# Altium footprint library YD-ESP32-S3.PcbLib: 1 footprints
Each footprint in its own frame and in the unit in brackets; x right, y up, seen from the top. Pads: shape width x height; smd on the part's side, far side on the other; paste and mask are expansions set on the pad; w line width, h text height; cw(c..) or ccw(c..) is an arc to the next point about the centre after c.
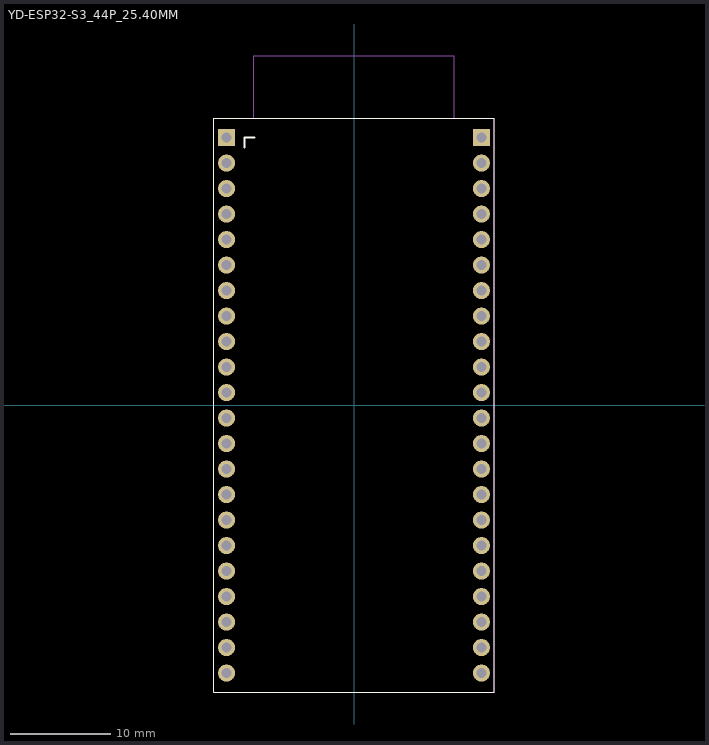
[diagram p0: the footprint, top view; thin cyan lines are the x and y axes]

## YD-ESP32-S3_44P_25.40MM [mm] "YD-ESP32-S3 dual USB-C, 2x22, 2.54 pitch, 25.40 row spacing. VCC-GND-derived land pattern with DevKitC J1/J3 pad designators."
pads (44):
  rect 1.7x1.7 hole 1: J1_1(-12.7,26.67) J3_1(12.7,26.67)
  round 1.7 hole 1: J1_2(-12.7,24.13) J1_3(-12.7,21.59) J1_4(-12.7,19.05) J1_5(-12.7,16.51) J1_6(-12.7,13.97) J1_7(-12.7,11.43) J1_8(-12.7,8.89) J1_9(-12.7,6.35) J1_10(-12.7,3.81) J1_11(-12.7,1.27) J1_12(-12.7,-1.27) J1_13(-12.7,-3.81) J1_14(-12.7,-6.35) J1_15(-12.7,-8.89) J1_16(-12.7,-11.43) J1_17(-12.7,-13.97) J1_18(-12.7,-16.51) J1_19(-12.7,-19.05) J1_20(-12.7,-21.59) J1_21(-12.7,-24.13) J1_22(-12.7,-26.67) J3_2(12.7,24.13) J3_3(12.7,21.59) J3_4(12.7,19.05) J3_5(12.7,16.51) J3_6(12.7,13.97) J3_7(12.7,11.43) J3_8(12.7,8.89) J3_9(12.7,6.35) J3_10(12.7,3.81) J3_11(12.7,1.27) J3_12(12.7,-1.27) J3_13(12.7,-3.81) J3_14(12.7,-6.35) J3_15(12.7,-8.89) J3_16(12.7,-11.43) J3_17(12.7,-13.97) J3_18(12.7,-16.51) J3_19(12.7,-19.05) J3_20(12.7,-21.59) J3_21(12.7,-24.13) J3_22(12.7,-26.67)
Top Overlay:
  lines w0.12: -13.97,-28.575 13.97,-28.575 13.97,28.575 -13.97,28.575 -13.97,-28.575
  lines w0.18: -10.9,25.67 -10.9,26.67 -9.9,26.67
Mechanical 1:
  lines w0.1: -13.97,-28.575 13.97,-28.575 13.97,28.575 -13.97,28.575 -13.97,-28.575 ; -10,28.575 10,28.575 10,34.815 -10,34.815 -10,28.575
3D body "YD-ESP32-S3.step": height 6.81, standoff -5.1, extent -13.975,-29.209 13.975,34.815